# EAGLE library part DISP_LCD_NOKIA (library dp_devices.v6)
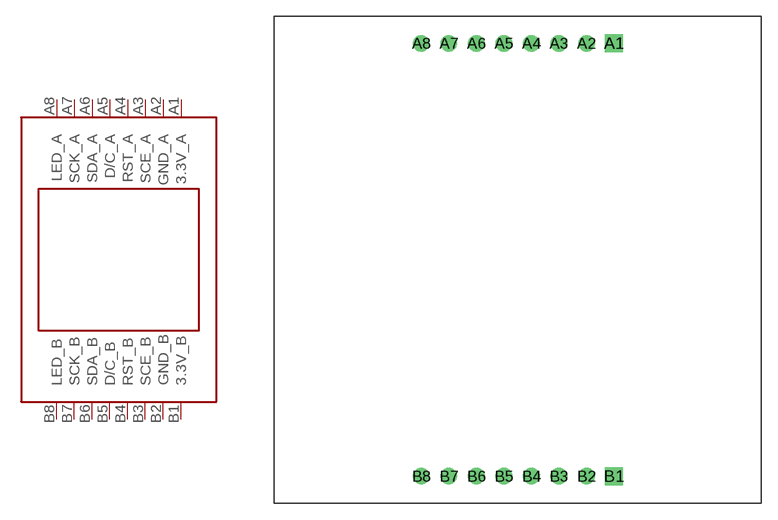
[diagram p151: symbol with the pads of DISP_NOKIA; footprint DISP_NOKIA]

Designator prefix LCD

## DISP_LCD_NOKIA  [DISP_NOKIA]
A1  3.3V_A
A2  GND_A
A3  SCE_A
A4  RST_A
A5  D/C_A
A6  SDA_A
A7  SCK_A
A8  LED_A
B1  3.3V_B
B2  GND_B
B3  SCE_B
B4  RST_B
B5  D/C_B
B6  SDA_B
B7  SCK_B
B8  LED_B

## Footprint DISP_NOKIA (pad centres in mm)
drill 1.02 pad 1.632 square: A1 8.89,20; B1 8.89,-20
drill 1.02: A2 6.35,20; A3 3.81,20; A4 1.27,20; A5 -1.27,20; A6 -3.81,20; A7 -6.35,20; A8 -8.89,20; B2 6.35,-20; B3 3.81,-20; B4 1.27,-20; B5 -1.27,-20; B6 -3.81,-20; B7 -6.35,-20; B8 -8.89,-20